# Altium footprint library Battery.PcbLib: 20 footprints (part 1 of 2)
Each footprint in its own frame and in the unit in brackets; x right, y up, seen from the top. Pads: shape width x height; smd on the part's side, far side on the other; paste and mask are expansions set on the pad; w line width, h text height; cw(c..) or ccw(c..) is an arc to the next point about the centre after c.
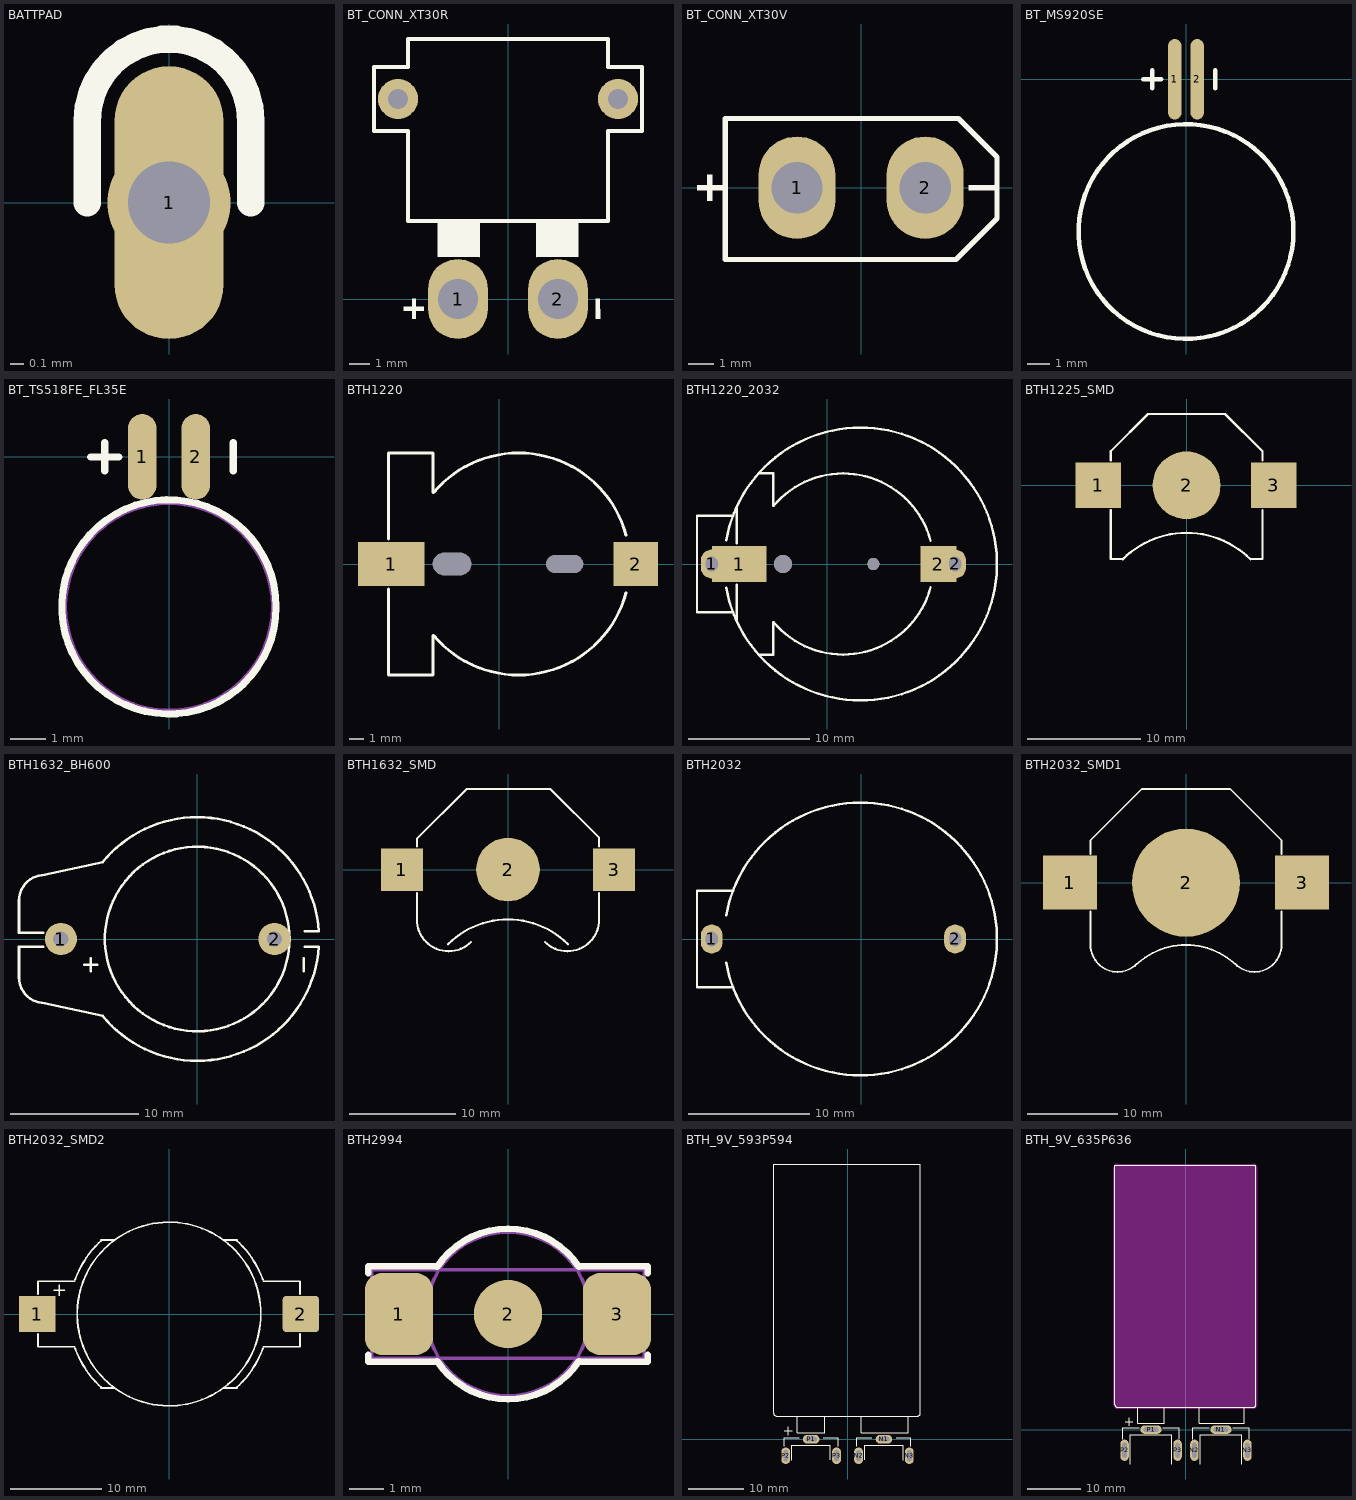
[diagram p0: the footprints below, top view; thin cyan lines are the x and y axes]

## BATTPAD [mm] "BATT PAD"
height 7.62
pads (1):
  oval 0.8x2 smd mask+0.1: 1(0,0)
via 0,0 diameter 0.9 hole 0.6
Top Overlay:
  lines w0.2: -0.6,0 -0.6,0.6 cw(c0,0.6) 0.6,0.6 0.6,0
Top Designator:
  text ".Designator" at -3.71,-0.244 h1.52

## BT_CONN_XT30R [mm] "BATTERY CONN XT30"
pads (4):
  oval 3x4 hole 2: 1(-2.5,0) 2(2.5,0)
  round 2 hole 1 unplated: ""(-5.5,10) ""(5.5,10)
Top Overlay:
  region: 4.6,-1 4.4,-1 4.4,0 4.6,0
  region: -4.6,-1 -4.8,-1 -4.8,0 -4.6,0
  region: -4.2,-0.4 -4.2,-0.6 -5.2,-0.6 -5.2,-0.4
  region: -1.4,2.1 -1.4,3.9 -3.5,3.9 -3.5,2.1
  region: 1.4,2.1 1.4,3.9 3.5,3.9 3.5,2.1
  lines w0.2: -6.7,8.4 -5,8.4 -5,3.9 5,3.9 5,8.4 6.7,8.4 6.7,11.6 5,11.6 5,13 -5,13 -5,11.6 -6.7,11.6 -6.7,8.4
Top Designator:
  text ".Designator" at -3.71,5.155 h1.52
3D body "XT30PW-M.step": height 5, standoff -2, extent -6.65,-1 6.65,12.95

## BT_CONN_XT30V [mm] "BATTERY CONN XT30"
pads (2):
  oval 3x4 hole 2: 1(-2.5,0) 2(2.5,0)
Top Overlay:
  region: 5.2,-0.1 5.2,0.1 4.2,0.1 4.2,-0.1
  region: -5.8,0.5 -6,0.5 -6,-0.5 -5.8,-0.5
  region: -5.4,-0.1 -5.4,0.1 -6.4,0.1 -6.4,-0.1
  lines w0.2: -5.3,-2.8 3.7,-2.8 5.3,-1.2 5.3,1.2 3.8,2.7 -5.3,2.7 -5.3,-2.8
Top Designator:
  text ".Designator" at -4.21,-0.394 h1.52
3D body "XT30.step": height 12.6, standoff -2.9, extent -5.2,-2.7 5.2,2.6

## BT_MS920SE [mm] "MS920SE SEIKO BATTERY"
height 2.1
pads (2):
  oval 0.6x3.6 smd: 1(-0.5,0) 2(0.5,0)
Top Overlay:
  circle w0.2: c0,-6.8 r4.8
  lines w0.2: -1.9,0 -1.1,0 ; -1.5,-0.4 -1.5,0.4 ; 1.3,-0.4 1.3,0.4
Top Designator:
  text ".Designator" at -3.71,-5.243 h1.52
3D body: height 2.1, standoff 0, extent -4.75,-11.55 4.75,-2.05

## BT_TS518FE_FL35E [mm] "MS518FE TS518FE FL35E SEIKO BATTERY"
height 2.1
pads (2):
  oval 0.8x2.4 smd: 1(-0.75,0) 2(0.75,0)
Top Overlay:
  circle w0.2: c0,-4.2 r3
  lines w0.2: -2.2,0 -1.4,0 ; -1.8,-0.4 -1.8,0.4 ; 1.8,-0.4 1.8,0.4
Top Designator:
  text ".Designator" at -3.71,-3.343 h1.52
Mechanical 13:
  circle w0.1: c0,-4.2 r2.9
3D body: height 2.1, standoff 0, extent -2.9,-7.1 2.9,-1.3

## BTH1220 [mm] "COIN CELL BATTERY HOLDER 1220 12mm"
height 2
pads (4):
  rect 4.5x3 smd: 1(-7.3,0)
  rect 3x3 smd: 2(9.2,0)
  round 1.5 hole 1.5 slot 2.6 at 0 deg unplated: ""(-3.2,0)
  round 1 hole 1.2 slot 2.5 at 0 deg unplated: ""(4.4,0)
Top Overlay:
  lines w0.2: -7.5,-1.7 -7.5,-7.5 -4.5,-7.5 -4.5,-4.821 ; -7.5,1.7 -7.5,7.5 -4.5,7.5 -4.5,4.821 ; -4.445,-4.821 ccw(c1.3,0) 8.544,-1.941 ; -4.445,4.821 cw(c1.3,0) 8.544,1.941
Top Designator:
  text ".Designator" at -3.135,-0.344 h1.52
3D body "SMD Battery Holder.step": height 4.26, standoff -0.49, extent -8.5,-7.4 10.3,7.349

## BTH1220_2032 [mm] "COIN CELL BATTERY HOLDER 1220 12mm CR2032"
height 2
pads (6):
  oval 1.8x2.4 hole 1 slot 1.2 at 90 deg: 1(-9.58,0) 2(10.58,0)
  rect 4.5x3 smd: 1(-7.3,0)
  rect 3x3 smd: 2(9.2,0)
  round 1.5 hole 1.5 unplated: ""(-3.683,0)
  round 1 hole 1 unplated: ""(3.81,0)
Top Overlay:
  lines w0.2: -8.378,-1.962 ccw(c2.75,0) -8.378,1.962 ; -7.8,-4 -10.8,-4 -10.8,4 -7.8,4 ; -7.5,-4.7 -7.5,-1.7 ; -7.5,1.7 -7.5,4.7 ; -5.6,-7.5 -4.5,-7.5 -4.5,-4.821 ; -5.6,7.5 -4.5,7.5 -4.5,4.821 ; -4.445,-4.821 ccw(c1.3,0) 8.544,-1.941 ; -4.445,4.821 cw(c1.3,0) 8.544,1.941
Top Designator:
  text ".Designator" at -2.085,-0.344 h1.52
3D body "1220.STEP": height 4.35, standoff -0.9, extent -9,-7.374 10.2,7.374

## BTH1225_SMD [mm] "Battery Holder CR1216, CR1220, CR1225,  BK-885"
height 7.6
pads (3):
  rect 4x4 smd: 1(-7.8,0) 3(7.7,0)
  round 6 smd: 2(0,0)
Top Overlay:
  lines w0.2: -6.7,-2.2 -6.7,-6.5 -5.7,-6.5 ; -6.7,2.2 -6.7,3 -3.4,6.3 3.4,6.3 6.7,3 6.7,2.2 ; -5.657,-6.543 cw(c0,-12.2) 5.657,-6.543 ; 5.7,-6.5 6.7,-6.5 6.7,-2.2
Top Designator:
  text ".Designator" at -3.76,-0.466 h1.52
3D body "User Library-CR1216.STEP": height 1.6, standoff 0, extent -6.18,-6.3 6.22,6.1
3D body "User Library-BK-885-TR.step": height 3.17, standoff 0, extent -9.76,-6.45 9.8,6.25

## BTH1632_BH600 [mm] "Battery Holder BH600 CR1632 CR1620 CR1616"
height 7.6
pads (2):
  round 2.5 hole 1.2: 1(-10.63,0) 2(6.03,0)
Top Overlay:
  circle w0.2: c0,0 r7.2
  lines w0.2: -12,-0.6 -13.9,-0.6 -13.9,-3 ccw(c-11.9,-3) -11.9,-5 -7.4,-6 ; -12,0.5 -13.9,0.5 -13.9,3 cw(c-11.9,3) -11.9,5 -7.4,6 ; -8.8,-2 -7.8,-2 ; -8.3,-2.5 -8.3,-1.5 ; -7.379,-5.983 ccw(c0,0) 9.481,-0.599 ; -7.379,5.983 cw(c0,0) 9.481,0.599 ; 8.3,-2.5 8.3,-1.5 ; 8.4,-0.6 9.481,-0.6 ; 8.4,0.6 9.481,0.6
Top Designator:
  text ".Designator" at -5.887,-0.344 h1.52
3D body "User Library-mpd bh600.step": height 8.34, standoff -4.36, extent -13.7,-9.522 9.647,9.525

## BTH1632_SMD [mm] "Battery Holder CR1632, KEYSTONE 3012TR or 3013"
height 7.6
pads (3):
  rect 4x4 smd: 1(-10,0) 3(10,0)
  round 6 smd: 2(0,0)
Top Overlay:
  lines w0.2: -8.6,-2.2 -8.6,-4.7 ccw(c-5.6,-4.7) -3.479,-6.821 ; -8.6,2.2 -8.6,2.9 -3.9,7.6 4,7.6 8.6,3 8.6,2.2 ; -5.657,-7.043 cw(c0,-12.7) 5.657,-7.043 ; 3.479,-6.821 ccw(c5.6,-4.7) 8.6,-4.7 8.6,-2.2
Top Designator:
  text ".Designator" at -3.71,-0.394 h1.52
3D body "User Library-keystone 3012-3013.step": height 4, standoff 0.04, extent -11.608,-7.7 11.608,7.642

## BTH2032 [mm] "CR2032 BATTERY HOLDER"
height 3.2
pads (2):
  oval 1.8x2.4 hole 1 slot 1.2 at 90 deg: 1(-12.38,0) 2(7.78,0)
Top Overlay:
  lines w0.2: -11.178,-1.962 ccw(c-0.05,0) -11.178,1.962 ; -10.6,-4 -13.6,-4 -13.6,4 -10.6,4
Top Designator:
  text ".Designator" at -4.885,-0.344 h1.52
3D body "CR2032_HOR_HOLD.step": height 8.5, standoff -4, extent -13.45,-11 11.05,11

## BTH2032_SMD1 [mm] "COIN CELL BATTERY HOLDER 2032 20mm KEYSTONE3002"
height 2
pads (3):
  rect 6x6 smd: 1(-12.9,0) 3(12.9,0)
  round 12 smd: 2(0,0)
Top Overlay:
  lines w0.2: -10.6,-3.2 -10.6,-6.9 ccw(c-7.6,-6.9) -5.479,-9.021 ; -10.6,3.2 -10.6,4.7 -4.9,10.4 4.9,10.4 10.6,4.7 10.6,3.2 ; -5.657,-9.243 cw(c0,-14.9) 5.657,-9.243 ; 5.479,-9.021 ccw(c7.6,-6.9) 10.6,-6.9 10.6,-3.2
Top Designator:
  text ".Designator" at -3.71,-0.094 h1.52
3D body "User Library-3002.step": height 4.06, standoff 0.1, extent -15.367,-9.779 15.367,10.274

## BTH2032_SMD2 [mm]
pads (2):
  rect 4x4 smd: 1(-14.5,0)
  rrect20% 4x4 smd: 2(14.5,0)
Top Overlay:
  circle w0.2: c0,0 r10.1
  lines w0.2: -14.4,-2.2 -14.4,-3.6 -10.4,-3.6 ; -14.4,2.2 -14.4,3.6 -10.4,3.6 ; -10.337,-3.762 ccw(c0,0) -7.36,-8.175 ; -10.337,3.762 cw(c0,0) -7.36,8.175 ; -7.5,-8.137 -5.992,-8.137 ; -7.5,8.137 -5.992,8.137 ; 5.992,-8.137 7.5,-8.137 ; 5.992,8.137 7.5,8.137 ; 7.36,-8.175 ccw(c0,0) 10.337,-3.762 ; 7.36,8.175 cw(c0,0) 10.337,3.762 ; 10.4,-3.6 14.4,-3.6 14.4,-2.2 ; 10.4,3.6 14.4,3.6 14.4,2.2
  text "+" at -11.2,3.2 h1.5
Top Designator:
  text ".Designator" at -3.71,-0.344 h1.52
3D body "SMD_Cell_Holder_Full.STEP": height 5.4, standoff 0, extent -15.9,-10 15.9,10

## BTH2994 [mm] "BUTTON CELL BATTERY RETAINER 2994"
height 1.2
pads (3):
  rrect50% 2x2.4 smd: 1(-3.2,0) 3(3.2,0)
  round 2 smd: 2(0,0)
Top Overlay:
  lines w0.2: -4.1,-1.2 -4.1,-1.4 -2.1,-1.4 ; -4.1,1.2 -4.1,1.4 -2.1,1.4 ; -2.08,-1.387 ccw(c0,0) 2.08,-1.387 ; -2.08,1.387 cw(c0,0) 2.08,1.387 ; 2.1,-1.4 4.1,-1.4 4.1,-1.2 ; 2.1,1.4 4.1,1.4 4.1,1.2
Top Designator:
  text ".Designator" at -3.71,-0.344 h1.52
Mechanical 13:
  circle w0.1: c0,0 r2.4
  lines w0.1: -4,-1.3 4,-1.3 4,1.3 -4,1.3 -4,-1.3
3D body: height 1.2, standoff 0, extent -2.4,-2.4 2.4,2.4
3D body: height 0.2, standoff 0, extent -4,-1.3 -2.6,1.3
3D body: height 0.2, standoff 0, extent 2.6,-1.3 4,1.3
3D body: height 1.4, standoff 0, extent -2.6,-1.3 2.6,1.3

## BTH_9V_593P594 [mm] "BATTERY HOLDER, keystone 593, 594"
pads (6):
  oval 3x1.6 hole 0.8 slot 2 at 0 deg: N1(6.6,0) P1(-6.6,0)
  oval 1.6x3 hole 0.8 slot 2 at 90 deg: N2(2,-3) N3(11.2,-3) P2(-11.2,-3) P3(-2,-3)
Top Overlay:
  lines w0.2: -11.5,-1.3 -11.5,0.3 -8.8,0.3 ; -11.5,1.5 -10,1.5 ; -10.75,0.75 -10.75,2.25 ; -10.1,-3.8 -10.1,-1.1 -3.1,-1.1 -3.1,-3.7 ; -9.1,4.2 -9.1,1.2 -4.1,1.2 -4.1,4.2 ; -4.4,0.3 -1.7,0.3 -1.7,-1.3 ; 1.7,-1.3 1.7,0.3 4.4,0.3 ; 2.5,4.2 2.5,1.2 11,1.2 11,4.2 ; 3.1,-3.7 3.1,-1.1 10.1,-1.1 10.1,-3.8 ; 8.8,0.3 11.5,0.3 11.5,-1.3 ; 12.7,4.2 ccw(c12.7,4.7) 13.2,4.7 13.2,49.9 -13.4,49.9 -13.4,4.7 ccw(c-12.9,4.7) -12.9,4.2 12.8,4.2
Top Designator:
  text ".Designator" at -3.81,22.355 h1.52
3D body "9V Duracell Battery-1.step": height 17.65, standoff 0.15, extent -13.35,1.3 13.15,49.799
3D body "keystone-PN593.STEP": height 14.35, standoff -2.67, extent 1.781,-3.793 11.433,3.726
3D body "keystone-PN594.STEP": height 14.27, standoff -2.74, extent -11.426,-3.8 -1.774,3.963

## BTH_9V_635P636 [mm] "BATTERY HOLDER, keystone 635, 636"
pads (6):
  oval 4x1.6 hole 0.8 slot 2.8 at 0 deg: N1(6.6,0) P1(-6.6,0)
  oval 1.6x4 hole 0.8 slot 2.8 at 90 deg: N2(1.6,-3.9) N3(11.6,-3.9) P2(-11.6,-3.9) P3(-1.6,-3.9)
Top Overlay:
  lines w0.2: -11.9,-1.8 -11.9,0.3 -8.8,0.3 ; -11.5,1.5 -10,1.5 ; -10.75,0.75 -10.75,2.25 ; -10.5,-6.5 -10.5,-1 -2.7,-1 -2.7,-1.1 -2.7,-6.5 ; -9.1,4.2 -9.1,1.2 -4.1,1.2 -4.1,4.2 ; -4.4,0.3 -1.3,0.3 -1.3,-1.8 ; 1.3,-1.8 1.3,0.3 4.4,0.3 ; 2.5,4.2 2.5,1.2 11,1.2 11,4.2 ; 2.7,-6.5 2.7,-1.1 2.7,-1 10.5,-1 10.5,-6.5 ; 8.8,0.3 11.9,0.3 11.9,-1.8 ; 12.7,4.2 ccw(c12.7,4.7) 13.2,4.7 13.2,49.9 -13.4,49.9 -13.4,4.7 ccw(c-12.9,4.7) -12.9,4.2 12.8,4.2
Keep-Out Layer:
  board cut-out: -13.6,4.7 -13.6,49.4 -13.6,49.469 -13.573,49.604 -13.52,49.732 -13.444,49.846 -13.346,49.944 -13.232,50.02 -13.104,50.073 -12.969,50.1 -12.9,50.1 12.7,50.1 12.769,50.1 12.904,50.073 13.032,50.02 13.146,49.944 13.244,49.846 13.32,49.732 13.373,49.604 13.4,49.469 13.4,49.4 13.4,4.7 13.4,4.631 13.373,4.496 13.32,4.368 13.244,4.254 13.146,4.156 13.032,4.08 12.904,4.027 12.769,4 12.7,4 -12.9,4 -12.969,4 -13.104,4.027 -13.232,4.08 -13.346,4.156 -13.444,4.254 -13.52,4.368 -13.573,4.496 -13.6,4.631
Keep-Out Layer:
  lines w0.2: -13.6,4.7 ccw(c-12.9,4.7) -12.9,4 12.7,4 ccw(c12.7,4.7) 13.4,4.7 13.4,49.4 ccw(c12.7,49.4) 12.7,50.1 -12.9,50.1 ccw(c-12.9,49.4) -13.6,49.4 -13.6,4.7
Top Designator:
  text ".Designator" at -3.81,21.456 h1.52
3D body "9V Duracell Battery-1.step": height 13.75, standoff -3.75, extent -13.35,1.3 13.15,49.799
3D body "keystone-PN636.STEP": height 10.02, standoff -4.21, extent -11.807,-6.5 -1.393,4.032
3D body "keystone-PN635.STEP": height 9.7, standoff -4.52, extent 1.393,-6.487 11.807,3.8